# Altium schematic symbol library HX1188NL.SchLib: 1 symbol
Pins are listed as number, name and electrical type; pins without a type are passive.

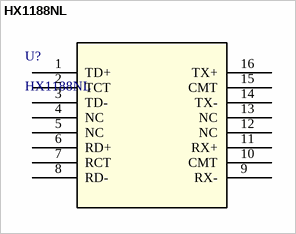
[diagram p0: symbol HX1188NL]

## HX1188NL
designator U?
Description; Manufacturer_Name: Pulse Electronics Corporation; Copyright: Copyright (C) 2025 Ultra Librarian. All rights reserved.; Manufacturer_Part_Number: HX1188NL; RefDes: RefDes; Type: Type
footprint PS-2005_001-G_PUL
pins: 1 TD+, 2 TCT, 3 TD-, 4 NC, 5 NC, 6 RD+, 7 RCT, 8 RD-, 9 RX-, 10 CMT, 11 RX+, 12 NC, 13 NC, 14 TX-, 15 CMT, 16 TX+